# Altium integrated library VIETTIEN_2.IntLib: 44 symbols (part 1 of 2)
Pins are listed as number, name and electrical type; pins without a type are passive.

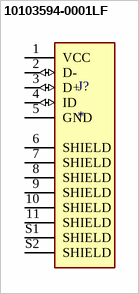
[diagram p0: symbol 10103594-0001LF]

## 10103594-0001LF
designator J?
USB - micro B USB 2.0 Receptacle Connector 5 Position Surface Mount, Right Angle; Through Hole; MF: {'manufacturer': u'Amphenol ICC (FCI)'}; MP: 10103594-0001LF; Package: None; Price: None; Value: *; Availability: Unavailable
footprint AMPHENOL_10103594-0001LF
pins: 1 VCC (power), 2 D- (io), 3 D+ (io), 4 ID (io), 5 GND (power), 6 SHIELD, 7 SHIELD, 8 SHIELD, 9 SHIELD, 10 SHIELD, 11 SHIELD, S1 SHIELD, S2 SHIELD


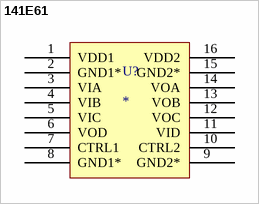
[diagram p1: symbol 141E61]

## 141E61
designator U?
4-Channel Digital Isolator, 3 Forward/1 Reverse, 5kVrms Isolation, SOIC-16 Wide , (300mil), SMD,π141E61
footprint SOIC127P1032X265-16N
pins: 1 VDD1, 2 GND1*, 3 VIA, 4 VIB, 5 VIC, 6 VOD, 7 CTRL1, 8 GND1*, 9 GND2*, 10 CTRL2, 11 VID, 12 VOC, 13 VOB, 14 VOA, 15 GND2*, 16 VDD2


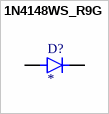
[diagram p2: symbol 1N4148WS_R9G]

## 1N4148WS_R9G
designator D?
150mA, 100V High Speed SMD Switching Diode; MF: Taiwan Semiconductor; MP: 1N4148WS R9G; SnapEDA_Link: https://www.snapeda.com/parts/1N4148WS%20R9G/Taiwan+Semiconductor/view-part/?ref=snap; Package: SOD-323F Taiwan Semiconductor; Value: *; Check_prices: https://www.snapeda.com/parts/1N4148WS%20R9G/Taiwan+Semiconductor/view-part/?ref=eda
footprint DIO_1N4148WS_R9G
pins: A, C K


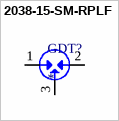
[diagram p3: symbol 2038-15-SM-RPLF]

## 2038-15-SM-RPLF
designator GDT?
Gas Tube, 3 Electr, 150V, 10kA, 5 mm, SMT, Reel pack, 2038 Series | Bourns 2038-15-SM-RPLF; MP: 2031-42T-SM-RPLF; SnapEDA_Link: https://www.snapeda.com/parts/2031-42T-SM-RPLF/Bourns/view-part/?ref=snap; Package: None; Value: *; MF: Bourns; Check_prices: https://www.snapeda.com/parts/2031-42T-SM-RPLF/Bourns/view-part/?ref=eda
footprint TVS_2031-42T-SM-RPLF
pins: 1, 2, 3


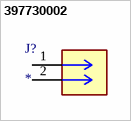
[diagram p4: symbol 397730002]

## 397730002
designator J?
2 Position Wire to Board Terminal Block Horizontal with Board 0.100 (2.54mm) Through Hole; MF: Molex; MP: 397730002; SnapEDA_Link: https://www.snapeda.com/parts/397730002/Molex/view-part/?ref=snap; Package: None; Value: *; Check_prices: https://www.snapeda.com/parts/397730002/Molex/view-part/?ref=eda
footprint CONN_39773-0002_MOL
pins: 1, 2


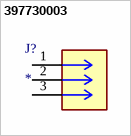
[diagram p5: symbol 397730003]

## 397730003
designator J?
3 Position Wire to Board Terminal Block Horizontal with Board 0.100 (2.54mm) Through Hole; MF: Molex; MP: 0397730003; SnapEDA_Link: https://www.snapeda.com/parts/0397730003/Molex/view-part/?ref=snap; Package: None; Value: *; Check_prices: https://www.snapeda.com/parts/0397730003/Molex/view-part/?ref=eda
footprint CONN_39773-0003_MOL
pins: 1, 2, 3


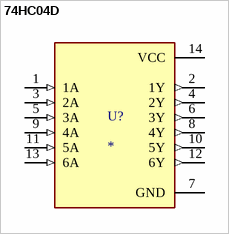
[diagram p6: symbol 74HC04D]

## 74HC04D
designator U?
Hex Inverters; MF: TAEJIN; MP: 74HC04D; SnapEDA_Link: https://www.snapeda.com/parts/74HC04D/TAEJIN/view-part/?ref=snap; Package: SOP-14 TAEJIN; Value: *; Check_prices: https://www.snapeda.com/parts/74HC04D/TAEJIN/view-part/?ref=eda
footprint SOP127P600X170-14N
pins: 1 1A (in), 2 1Y (out), 3 2A (in), 4 2Y (out), 5 3A (in), 6 3Y (out), 7 GND (power), 8 4Y (out), 9 4A (in), 10 5Y (out), 11 5A (in), 12 6Y (out), 13 6A (in), 14 VCC (power)


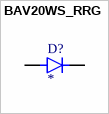
[diagram p7: symbol BAV20WS_RRG]

## BAV20WS_RRG
designator D?
MF: {'manufacturer': u'Taiwan Semiconductor'}; MP: BAV20WS_RRG; Package: None; Price: None; Value: *; Availability: Unavailable
footprint DIO_BAV20WS_RRG
pins: A, C K


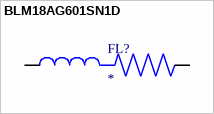
[diagram p8: symbol BLM18AG601SN1D]

## BLM18AG601SN1D
designator FL?
600 Ohms @ 100 MHz 1 - Ferrite Bead 0603 (1608 Metric) 500mA 380mOhm; MF: Murata; MP: BLM18AG601SN1D; Check_prices: https://www.snapeda.com/parts/BLM18AG601SN1D/Murata/view-part/?ref=eda; SnapEDA_Link: https://www.snapeda.com/parts/BLM18AG601SN1D/Murata/view-part/?ref=snap; Availability: In Stock; Value: *; Price: None; Package: 1608 Murata; Purchase-URL: https://pricing.snapeda.com/search/part/BLM18AG601SN1D/?ref=eda
footprint BEADC1608X95N
pins: 1, 2


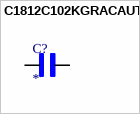
[diagram p9: symbol C1812C102KGRACAUTO]

## C1812C102KGRACAUTO
designator C?
1000 pF Â±10% 2000V (2kV) Ceramic Capacitor X7R 1812 (4532 Metric); MF: KEMET; MP: C1812C102KGRACAUTO; SnapEDA_Link: https://www.snapeda.com/parts/C1812C102KGRACAUTO/KEMET/view-part/?ref=snap; Package: 4532 KEMET; Value: *; Check_prices: https://www.snapeda.com/parts/C1812C102KGRACAUTO/KEMET/view-part/?ref=eda
footprint CAPC4532X155N
pins: 1, 2


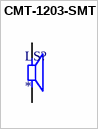
[diagram p10: symbol CMT-1203-SMT]

## CMT-1203-SMT
designator LS?
12 mm, 25 V, 81 dB, Surface Mount (SMT), Piezo Audio Transducer Buzzer; MF: Same Sky; MP: CMT-1203-SMT-TR; SnapEDA_Link: https://www.snapeda.com/parts/CMT-1203-SMT-TR/Same+Sky/view-part/?ref=snap; Package: CUI Inc.; Value: *; Check_prices: https://www.snapeda.com/parts/CMT-1203-SMT-TR/Same+Sky/view-part/?ref=eda
footprint CUI_CMT-1203-SMT
pins: 1, 2


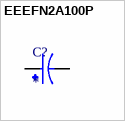
[diagram p11: symbol EEEFN2A100P]

## EEEFN2A100P
designator C?
CAP ALUM 10UF 20% 100V SMD; MF: Panasonic; MP: EEEFN2A100P; SnapEDA_Link: https://www.snapeda.com/parts/EEEFN2A100P/Panasonic/view-part/?ref=snap; Package: RADIAL-2 Panasonic; Value: *; Check_prices: https://www.snapeda.com/parts/EEEFN2A100P/Panasonic/view-part/?ref=eda
footprint CAP_EEEFN2A100P
pins: 1, 2


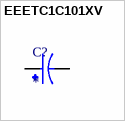
[diagram p12: symbol EEETC1C101XV]

## EEETC1C101XV
designator C?
CAP ALUM 100UF 20% 16V SMD; MF: Panasonic; MP: EEETC1C101XV; Package: RADIAL-2 Panasonic; Price: None; Check_prices: https://www.snapeda.com/parts/EEETC1C101XV/Panasonic/view-part/?ref=eda; Value: *; SnapEDA_Link: https://www.snapeda.com/parts/EEETC1C101XV/Panasonic/view-part/?ref=snap; Availability: In Stock; Purchase-URL: https://pricing.snapeda.com/search/part/EEETC1C101XV/?ref=eda
footprint CAP_EEETC1C101XV
pins: 1, 2


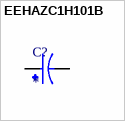
[diagram p13: symbol EEHAZC1H101B]

## EEHAZC1H101B
designator C?
CAP ALUM POLY 100UF 20% 50V T/H; MP: EEHAZC1H101B; MF: Panasonic; Package: RADIAL-2 Panasonic; Availability: In Stock; Value: *; SnapEDA_Link: https://www.snapeda.com/parts/EEHAZC1H101B/Panasonic/view-part/?ref=snap; Price: None; Check_prices: https://www.snapeda.com/parts/EEHAZC1H101B/Panasonic/view-part/?ref=eda; Purchase-URL: https://pricing.snapeda.com/search/part/EEHAZC1H101B/?ref=eda
footprint CAPPRD500W60D1000H950
pins: N, P


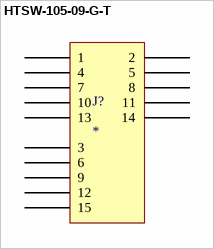
[diagram p14: symbol HTSW-105-09-G-T]

## HTSW-105-09-G-T
designator J?
15-Pin (3x5) Triple-Row Vertical Male Pin Header, 2.54mm Pitch, THT, Gold-Plated Contacts
footprint HTSW-105-09-G-T
pins: 1, 2, 3, 4, 5, 6, 7, 8, 9, 10, 11, 12, 13, 14, 15


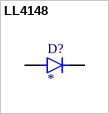
[diagram p15: symbol LL4148]

## LL4148
designator D?
Small Signal Diode, SOD-80, 100V, 0.15A, 175Â°C; MF: Diotec Semiconductor; MP: LL4148; SnapEDA_Link: https://www.snapeda.com/parts/LL4148/Diotec/view-part/?ref=snap; Package: SOD-80 Diotec; Value: *; Check_prices: https://www.snapeda.com/parts/LL4148/Diotec/view-part/?ref=eda
footprint DIO_LL4148
pins: A, C


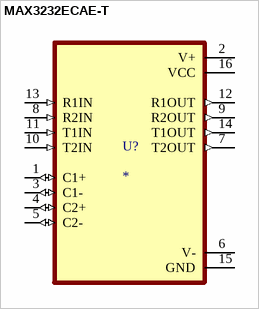
[diagram p16: symbol MAX3232ECAE-T]

## MAX3232ECAE-T
designator U?
Â±15kV ESD-Protected, Down to 10nA, 3.0V to 5.5V, Up to 1Mbps, True RS-232 Transceivers; MF: Analog Devices; MP: MAX3232ECAE+T; SnapEDA_Link: https://www.snapeda.com/parts/MAX3232ECAE+T/Analog+Devices/view-part/?ref=snap; Package: SSOP-16 Maxim; Value: *; Check_prices: https://www.snapeda.com/parts/MAX3232ECAE+T/Analog+Devices/view-part/?ref=eda
footprint SOP65P777X199-16N
pins: 1 C1+ (io), 2 V+ (power), 3 C1- (io), 4 C2+ (io), 5 C2- (io), 6 V- (power), 7 T2OUT (out), 8 R2IN (in), 9 R2OUT (out), 10 T2IN (in), 11 T1IN (in), 12 R1OUT (out), 13 R1IN (in), 14 T1OUT (out), 15 GND (power), 16 VCC (power)


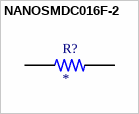
[diagram p17: symbol NANOSMDC016F-2]

## NANOSMDC016F-2
designator R?
PTC RESETTABLE FUSE, 48VDC, 1206; Thermistor Mounting:SMD; Product Range:PolySwitch nanoSMDC Series; Holding Current:160mA; Tripping Current:450mA; Voltage Rating:48VDC; Operating Temperature Min:-40Â°C; Operating Tempera; MF: Littelfuse, Inc.; MP: NANOSMDC016F-2; SnapEDA_Link: https://www.snapeda.com/parts/NANOSMDC016F-2/Littelfuse/view-part/?ref=snap; Package: 1206 Littelfuse; Value: *; Check_prices: https://www.snapeda.com/parts/NANOSMDC016F-2/Littelfuse/view-part/?ref=eda
footprint RESC3115X65N
pins: 1, 2


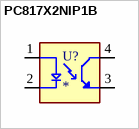
[diagram p18: symbol PC817X2NIP1B]

## PC817X2NIP1B
designator U?
Optocoupler DC-IN 1-CH Transistor DC-OUT 4-Pin DIP SMD T/R; MF: Sharp Microelectronics; MP: PC817X2NIP1B; SnapEDA_Link: https://www.snapeda.com/parts/PC817X2NIP1B/Sharp+Microelectronics/view-part/?ref=snap; Package: SMD-4 Sharp Microelectronics; Value: *; Check_prices: https://www.snapeda.com/parts/PC817X2NIP1B/Sharp+Microelectronics/view-part/?ref=eda
footprint SOIC254P960X420-4N
pins: 1 A, 2 C, 3 ET, 4 CT


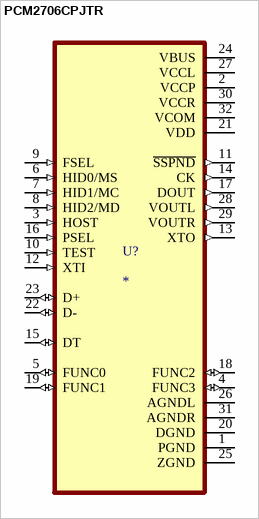
[diagram p19: symbol PCM2706CPJTR]

## PCM2706CPJTR
designator U?
MP: PCM2706CPJTR; Package: None; Price: None; Value: *; Availability: Unavailable
footprint QFP80P900X900X120-32N
pins: 1 PGND (power), 2 VCCP (power), 3 HOST (in), 4 FUNC3 (io), 5 FUNC0 (io), 6 HID0/MS (in), 7 HID1/MC (in), 8 HID2/MD (in), 9 FSEL (in), 10 TEST (in), 11 ~{SSPND} (out), 12 XTI (in), 13 XTO (out), 14 CK (out), 15 DT (io), 16 PSEL (in), 17 DOUT (out), 18 FUNC2 (io), 19 FUNC1 (io), 20 DGND (power), 21 VDD (power), 22 D- (io), 23 D+ (io), 24 VBUS (power), 25 ZGND (power), 26 AGNDL (power), 27 VCCL (power), 28 VOUTL (out), 29 VOUTR (out), 30 VCCR (power), 31 AGNDR (power), 32 VCOM (power)


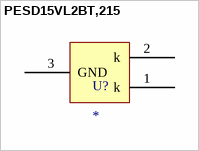
[diagram p20: symbol PESD15VL2BT,215]

## PESD15VL2BT,215
designator U?
44V Clamp 5A (8/20µs) Ipp Tvs Diode Surface Mount TO-236AB / PESD15VL2BT,215
footprint SOT95P280X145-5N
pins: 1 k, 2 k, 3 GND


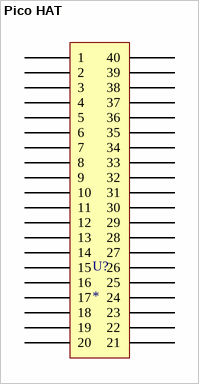
[diagram p21: symbol Pico HAT]

## Pico HAT
designator U?
footprint Pico_HAT
pins: 1, 2, 3, 4, 5, 6, 7, 8, 9, 10, 11, 12, 13, 14, 15, 16, 17, 18, 19, 20, 21, 22, 23, 24, 25, 26, 27, 28, 29, 30, 31, 32, 33, 34, 35, 36, 37, 38, 39, 40


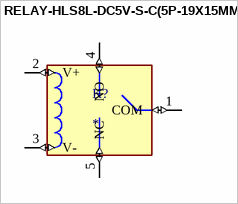
[diagram p22: symbol RELAY-HLS8L-DC5V-S-C(5P-19X15MM)]

## RELAY-HLS8L-DC5V-S-C(5P-19X15MM)
designator K?
DIP Power Relay 5V-7A;; MF: Helishun; MP: HLS8L-DC5V-S-C; SnapEDA_Link: https://www.snapeda.com/parts/HLS8L-DC5V-S-C/Helishun/view-part/?ref=snap; Package: None; Value: *; Check_prices: https://www.snapeda.com/parts/HLS8L-DC5V-S-C/Helishun/view-part/?ref=eda
footprint REY5-19.0X15.0X15.0MM
pins: 1 COM (io), 2 V+ (io), 3 V- (io), 4 NO (io), 5 NC (io)
